# Altium footprint library Components - 07.12.20 - 23.27.PcbLib: 1 footprints
Each footprint in its own frame and in the unit in brackets; x right, y up, seen from the top. Pads: shape width x height; smd on the part's side, far side on the other; paste and mask are expansions set on the pad; w line width, h text height; cw(c..) or ccw(c..) is an arc to the next point about the centre after c.
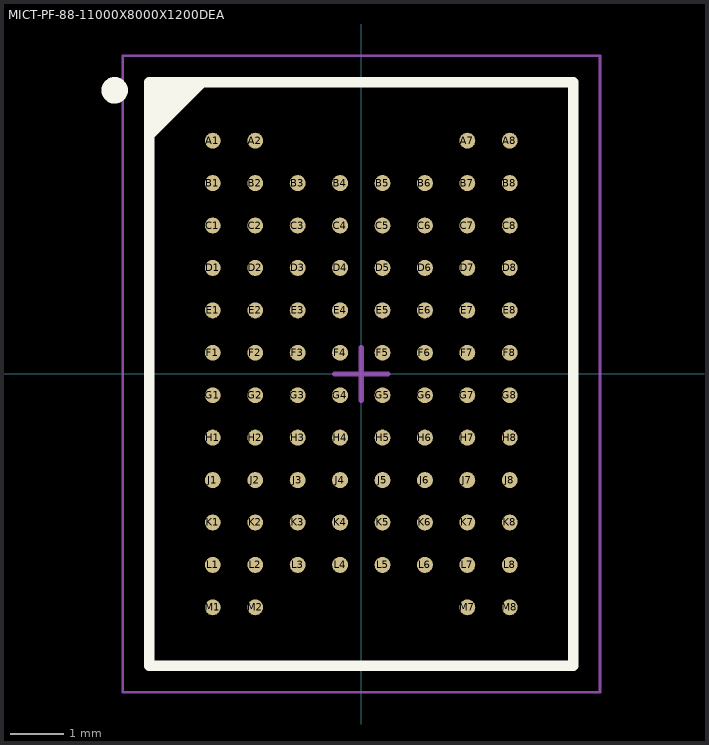
[diagram p0: the footprint, top view; thin cyan lines are the x and y axes]

## MICT-PF-88-11000X8000X1200DEA [mm] "BGA, 88-Balls, Body 11x8mm, Pitch 0.8mm"
pads (88):
  round 0.3 smd: A1(-2.8,4.4) A2(-2,4.4) A7(2,4.4) A8(2.8,4.4) B1(-2.8,3.6) B2(-2,3.6) B3(-1.2,3.6) B4(-0.4,3.6) B5(0.4,3.6) B6(1.2,3.6) B7(2,3.6) B8(2.8,3.6) C1(-2.8,2.8) C2(-2,2.8) C3(-1.2,2.8) C4(-0.4,2.8) C5(0.4,2.8) C6(1.2,2.8) C7(2,2.8) C8(2.8,2.8) D1(-2.8,2) D2(-2,2) D3(-1.2,2) D4(-0.4,2) D5(0.4,2) D6(1.2,2) D7(2,2) D8(2.8,2) E1(-2.8,1.2) E2(-2,1.2) E3(-1.2,1.2) E4(-0.4,1.2) E5(0.4,1.2) E6(1.2,1.2) E7(2,1.2) E8(2.8,1.2) F1(-2.8,0.4) F2(-2,0.4) F3(-1.2,0.4) F4(-0.4,0.4) F5(0.4,0.4) F6(1.2,0.4) F7(2,0.4) F8(2.8,0.4) G1(-2.8,-0.4) G2(-2,-0.4) G3(-1.2,-0.4) G4(-0.4,-0.4) G5(0.4,-0.4) G6(1.2,-0.4) G7(2,-0.4) G8(2.8,-0.4) H1(-2.8,-1.2) H2(-2,-1.2) H3(-1.2,-1.2) H4(-0.4,-1.2) H5(0.4,-1.2) H6(1.2,-1.2) H7(2,-1.2) H8(2.8,-1.2) J1(-2.8,-2) J2(-2,-2) J3(-1.2,-2) J4(-0.4,-2) J5(0.4,-2) J6(1.2,-2) J7(2,-2) J8(2.8,-2) K1(-2.8,-2.8) K2(-2,-2.8) K3(-1.2,-2.8) K4(-0.4,-2.8) K5(0.4,-2.8) K6(1.2,-2.8) K7(2,-2.8) K8(2.8,-2.8) L1(-2.8,-3.6) L2(-2,-3.6) L3(-1.2,-3.6) L4(-0.4,-3.6) L5(0.4,-3.6) L6(1.2,-3.6) L7(2,-3.6) L8(2.8,-3.6) M1(-2.8,-4.4) M2(-2,-4.4) M7(2,-4.4) M8(2.8,-4.4)
Top Overlay:
  circle w0.25: c-4.65,5.35 r0.125
  region: -3,5.5 -4,4.5 -4,5.5
  lines w0.2: -4,4.5 -3,5.5 ; -4,-5.5 -4,5.5 4,5.5 4,-5.5 -4,-5.5
Mechanical 13:
  lines w0.1: -4,-5.5 -4,5.5 4,5.5 4,-5.5 -4,-5.5
Mechanical 15:
  lines w0.05: -4.5,-6 -4.5,6 4.5,6 4.5,-6 -4.5,-6
  lines w0.1: -0.5,0 0.5,0 ; 0,-0.5 0,0.5
3D body: height 0.2, standoff 0, extent -4,-5.5 4,5.5